# Altium schematic symbol library SC7A22H.SchLib: 1 symbol
Pins are listed as number, name and electrical type; pins without a type are passive.

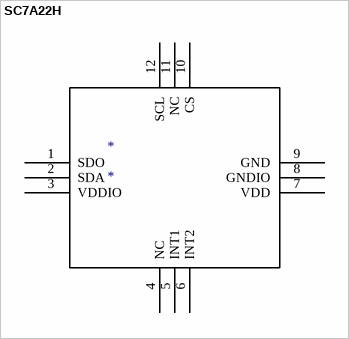
[diagram p0: symbol SC7A22H]

## SC7A22H
designator *
footprint LGA-12_L2.0-W2.0-P0.50-BL
pins: 1 SDO, 2 SDA, 3 VDDIO, 4 NC, 5 INT1, 6 INT2, 7 VDD, 8 GNDIO, 9 GND, 10 CS, 11 NC, 12 SCL